# Altium footprint library KEYSTONE_1043.PcbLib: 1 footprints
Each footprint in its own frame and in the unit in brackets; x right, y up, seen from the top. Pads: shape width x height; smd on the part's side, far side on the other; paste and mask are expansions set on the pad; w line width, h text height; cw(c..) or ccw(c..) is an arc to the next point about the centre after c.
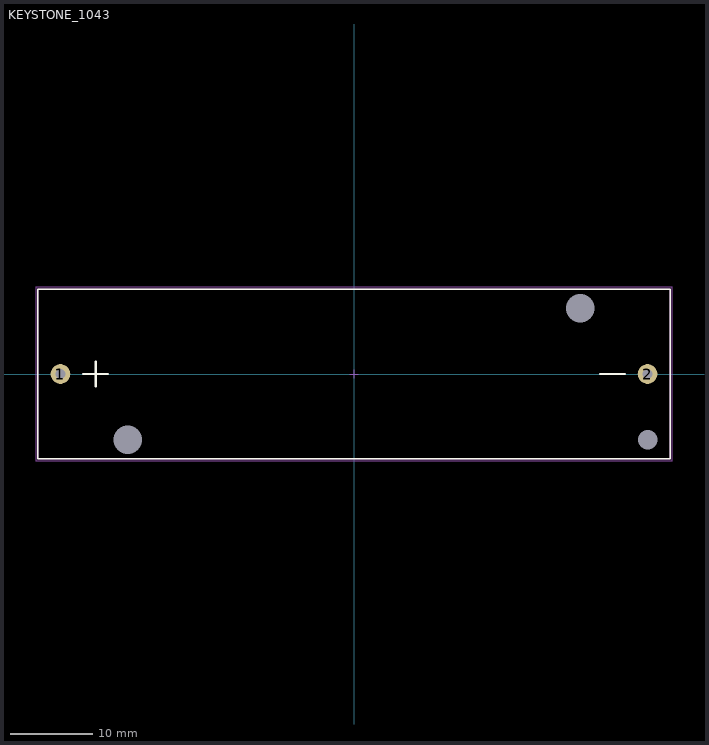
[diagram p0: the footprint, top view; thin cyan lines are the x and y axes]

## KEYSTONE_1043 [mm] "Keystone 1043, 18650 cell holder, through hole"
height 18
pads (5):
  round 2.4 hole 1.2 mask+0.05: 1(-35.8,0) 2(35.8,0)
  round 0 hole 3.45 unplated mask+0.05: ""(-27.6,-8) ""(27.6,8)
  round 0 hole 2.39 unplated mask+0.05: ""(35.8,-8)
Top Overlay:
  lines w0.2: -38.55,-10.35 38.55,-10.35 38.55,10.35 -38.55,10.35 -38.55,-10.35
  lines w0.3: -33,0 -30,0 ; -31.5,-1.5 -31.5,1.5 ; 30,0 33,0
Mechanical 13:
  lines w0.1: -38.55,-10.35 38.55,-10.35 38.55,10.35 -38.55,10.35 -38.55,-10.35
Mechanical 15:
  lines w0.05: -38.8,-10.6 38.8,-10.6 38.8,10.6 -38.8,10.6 -38.8,-10.6
  lines w0.1: -0.5,0 0.5,0 ; 0,-0.5 0,0.5